# Altium footprint library Miscellaneous Devices.PcbLib: 306 footprints (part 10 of 20)
Each footprint in its own frame and in the unit in brackets; x right, y up, seen from the top. Pads: shape width x height; smd on the part's side, far side on the other; paste and mask are expansions set on the pad; w line width, h text height; cw(c..) or ccw(c..) is an arc to the next point about the centre after c.
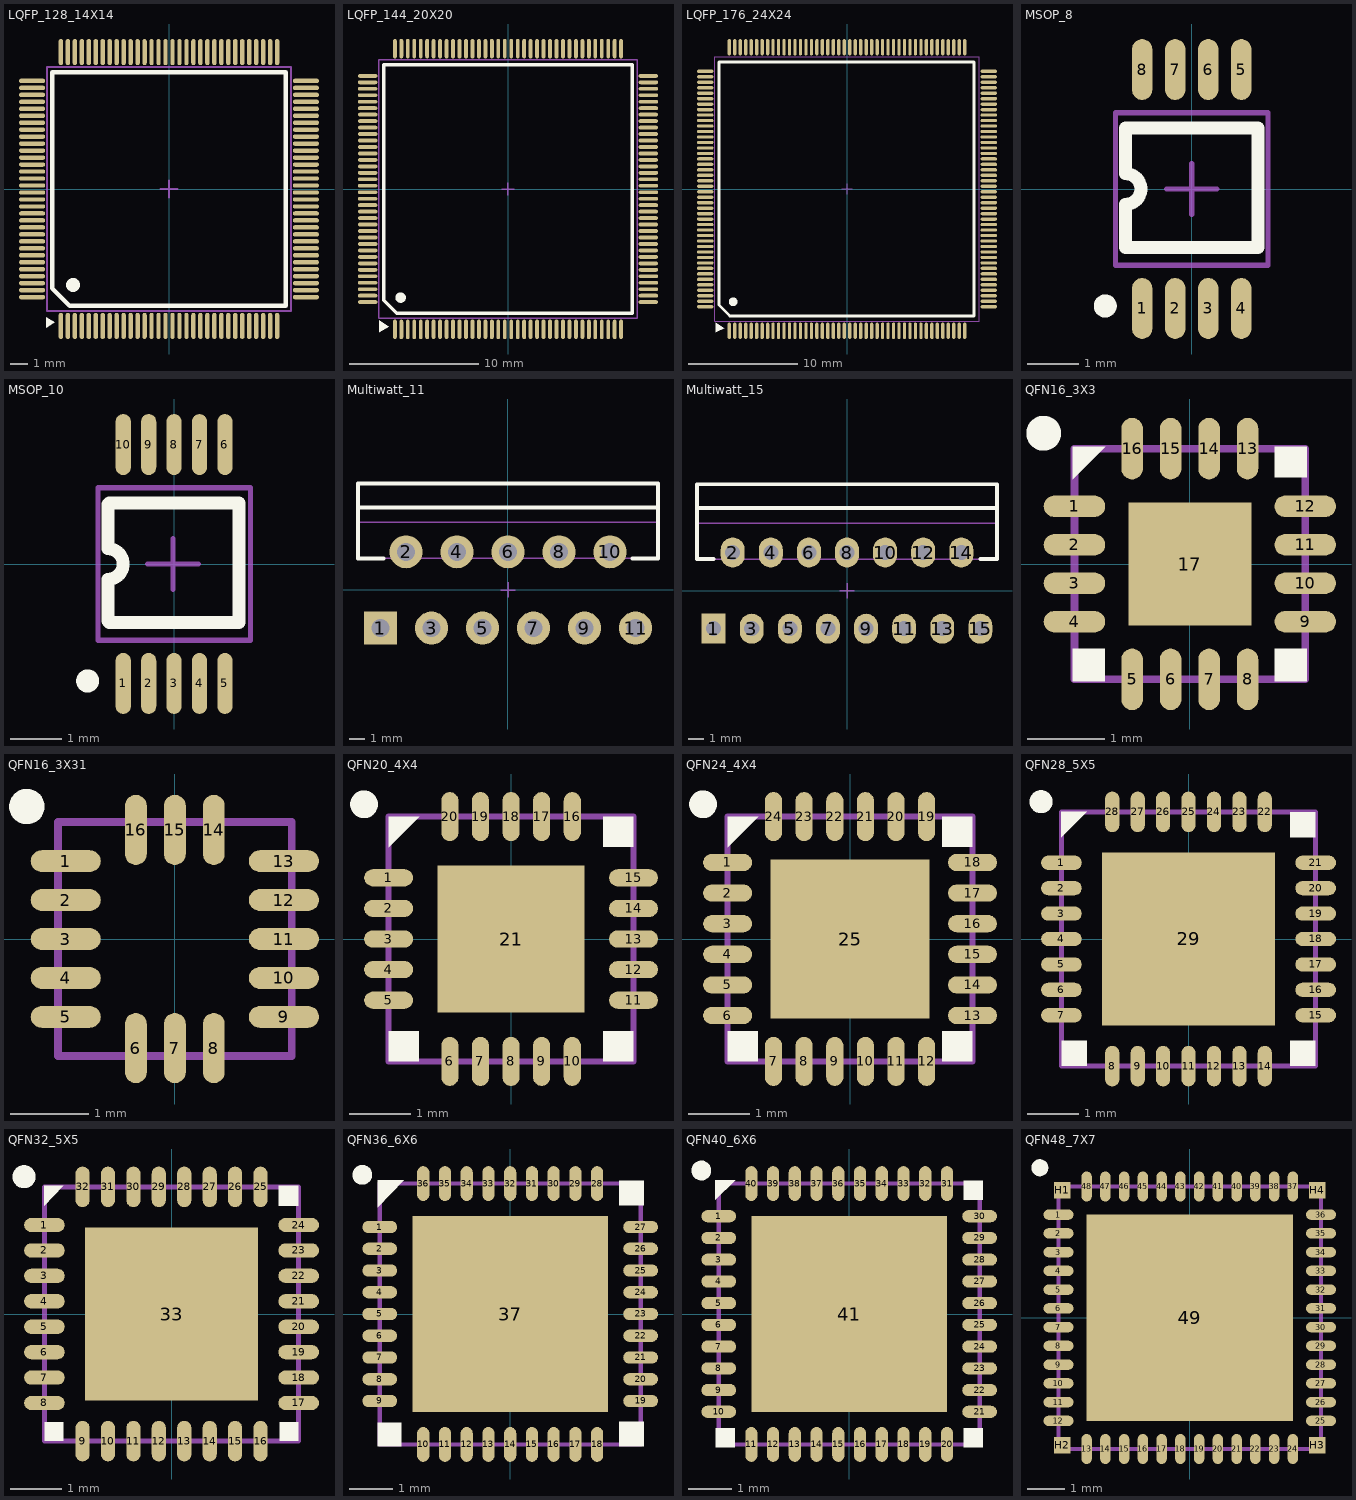
[diagram p9: the footprints below, top view; thin cyan lines are the x and y axes]

## LQFP_128_14X14 [mm]
pads (128):
  oval 0.25x1.5 smd mask+0.051: 1(-6.2,-7.85) 2(-5.8,-7.85) 3(-5.4,-7.85) 4(-5,-7.85) 5(-4.6,-7.85) 6(-4.2,-7.85) 7(-3.8,-7.85) 8(-3.4,-7.85) 9(-3,-7.85) 10(-2.6,-7.85) 11(-2.2,-7.85) 12(-1.8,-7.85) 13(-1.4,-7.85) 14(-1,-7.85) 15(-0.6,-7.85) 16(-0.2,-7.85) 17(0.2,-7.85) 18(0.6,-7.85) 19(1,-7.85) 20(1.4,-7.85) 21(1.8,-7.85) 22(2.2,-7.85) 23(2.6,-7.85) 24(3,-7.85) 25(3.4,-7.85) 26(3.8,-7.85) 27(4.2,-7.85) 28(4.6,-7.85) 29(5,-7.85) 30(5.4,-7.85) 31(5.8,-7.85) 32(6.2,-7.85) 65(6.2,7.85) 66(5.8,7.85) 67(5.4,7.85) 68(5,7.85) 69(4.6,7.85) 70(4.2,7.85) 71(3.8,7.85) 72(3.4,7.85) 73(3,7.85) 74(2.6,7.85) 75(2.2,7.85) 76(1.8,7.85) 77(1.4,7.85) 78(1,7.85) 79(0.6,7.85) 80(0.2,7.85) 81(-0.2,7.85) 82(-0.6,7.85) 83(-1,7.85) 84(-1.4,7.85) 85(-1.8,7.85) 86(-2.2,7.85) 87(-2.6,7.85) 88(-3,7.85) 89(-3.4,7.85) 90(-3.8,7.85) 91(-4.2,7.85) 92(-4.6,7.85) 93(-5,7.85) 94(-5.4,7.85) 95(-5.8,7.85) 96(-6.2,7.85)
  oval 1.5x0.25 smd mask+0.051: 33(7.85,-6.2) 34(7.85,-5.8) 35(7.85,-5.4) 36(7.85,-5) 37(7.85,-4.6) 38(7.85,-4.2) 39(7.85,-3.8) 40(7.85,-3.4) 41(7.85,-3) 42(7.85,-2.6) 43(7.85,-2.2) 44(7.85,-1.8) 45(7.85,-1.4) 46(7.85,-1) 47(7.85,-0.6) 48(7.85,-0.2) 49(7.85,0.2) 50(7.85,0.6) 51(7.85,1) 52(7.85,1.4) 53(7.85,1.8) 54(7.85,2.2) 55(7.85,2.6) 56(7.85,3) 57(7.85,3.4) 58(7.85,3.8) 59(7.85,4.2) 60(7.85,4.6) 61(7.85,5) 62(7.85,5.4) 63(7.85,5.8) 64(7.85,6.2) 97(-7.85,6.2) 98(-7.85,5.8) 99(-7.85,5.4) 100(-7.85,5) 101(-7.85,4.6) 102(-7.85,4.2) 103(-7.85,3.8) 104(-7.85,3.4) 105(-7.85,3) 106(-7.85,2.6) 107(-7.85,2.2) 108(-7.85,1.8) 109(-7.85,1.4) 110(-7.85,1) 111(-7.85,0.6) 112(-7.85,0.2) 113(-7.85,-0.2) 114(-7.85,-0.6) 115(-7.85,-1) 116(-7.85,-1.4) 117(-7.85,-1.8) 118(-7.85,-2.2) 119(-7.85,-2.6) 120(-7.85,-3) 121(-7.85,-3.4) 122(-7.85,-3.8) 123(-7.85,-4.2) 124(-7.85,-4.6) 125(-7.85,-5) 126(-7.85,-5.4) 127(-7.85,-5.8) 128(-7.85,-6.2)
Top Overlay:
  circle w0.4: c-5.5,-5.5 r0.2
  region: -7.05,-7.95 -6.55,-7.65 -7.05,-7.35
  lines w0.254: -6.7,-5.7 -6.7,6.7 6.7,6.7 6.7,-6.7 -5.7,-6.7 -6.7,-5.7
Mechanical 15:
  lines w0.1: -0.5,0 0.5,0 ; 0,-0.5 0,0.5 ; -7,-7 -7,7 7,7 7,-7 -7,-7
3D body: height 1.35, standoff 0, extent -8,-8 8,8

## LQFP_144_20X20 [mm]
pads (144):
  oval 0.3x1.5 smd: 1(-8.75,-10.85) 2(-8.25,-10.85) 3(-7.75,-10.85) 4(-7.25,-10.85) 5(-6.75,-10.85) 6(-6.25,-10.85) 7(-5.75,-10.85) 8(-5.25,-10.85) 9(-4.75,-10.85) 10(-4.25,-10.85) 11(-3.75,-10.85) 12(-3.25,-10.85) 13(-2.75,-10.85) 14(-2.25,-10.85) 15(-1.75,-10.85) 16(-1.25,-10.85) 17(-0.75,-10.85) 18(-0.25,-10.85) 19(0.25,-10.85) 20(0.75,-10.85) 21(1.25,-10.85) 22(1.75,-10.85) 23(2.25,-10.85) 24(2.75,-10.85) 25(3.25,-10.85) 26(3.75,-10.85) 27(4.25,-10.85) 28(4.75,-10.85) 29(5.25,-10.85) 30(5.75,-10.85) 31(6.25,-10.85) 32(6.75,-10.85) 33(7.25,-10.85) 34(7.75,-10.85) 35(8.25,-10.85) 36(8.75,-10.85) 73(8.75,10.85) 74(8.25,10.85) 75(7.75,10.85) 76(7.25,10.85) 77(6.75,10.85) 78(6.25,10.85) 79(5.75,10.85) 80(5.25,10.85) 81(4.75,10.85) 82(4.25,10.85) 83(3.75,10.85) 84(3.25,10.85) 85(2.75,10.85) 86(2.25,10.85) 87(1.75,10.85) 88(1.25,10.85) 89(0.75,10.85) 90(0.25,10.85) 91(-0.25,10.85) 92(-0.75,10.85) 93(-1.25,10.85) 94(-1.75,10.85) 95(-2.25,10.85) 96(-2.75,10.85) 97(-3.25,10.85) 98(-3.75,10.85) 99(-4.25,10.85) 100(-4.75,10.85) 101(-5.25,10.85) 102(-5.75,10.85) 103(-6.25,10.85) 104(-6.75,10.85) 105(-7.25,10.85) 106(-7.75,10.85) 107(-8.25,10.85) 108(-8.75,10.85)
  oval 1.5x0.3 smd: 37(10.85,-8.75) 38(10.85,-8.25) 39(10.85,-7.75) 40(10.85,-7.25) 41(10.85,-6.75) 42(10.85,-6.25) 43(10.85,-5.75) 44(10.85,-5.25) 45(10.85,-4.75) 46(10.85,-4.25) 47(10.85,-3.75) 48(10.85,-3.25) 49(10.85,-2.75) 50(10.85,-2.25) 51(10.85,-1.75) 52(10.85,-1.25) 53(10.85,-0.75) 54(10.85,-0.25) 55(10.85,0.25) 56(10.85,0.75) 57(10.85,1.25) 58(10.85,1.75) 59(10.85,2.25) 60(10.85,2.75) 61(10.85,3.25) 62(10.85,3.75) 63(10.85,4.25) 64(10.85,4.75) 65(10.85,5.25) 66(10.85,5.75) 67(10.85,6.25) 68(10.85,6.75) 69(10.85,7.25) 70(10.85,7.75) 71(10.85,8.25) 72(10.85,8.75) 109(-10.85,8.75) 110(-10.85,8.25) 111(-10.85,7.75) 112(-10.85,7.25) 113(-10.85,6.75) 114(-10.85,6.25) 115(-10.85,5.75) 116(-10.85,5.25) 117(-10.85,4.75) 118(-10.85,4.25) 119(-10.85,3.75) 120(-10.85,3.25) 121(-10.85,2.75) 122(-10.85,2.25) 123(-10.85,1.75) 124(-10.85,1.25) 125(-10.85,0.75) 126(-10.85,0.25) 127(-10.85,-0.25) 128(-10.85,-0.75) 129(-10.85,-1.25) 130(-10.85,-1.75) 131(-10.85,-2.25) 132(-10.85,-2.75) 133(-10.85,-3.25) 134(-10.85,-3.75) 135(-10.85,-4.25) 136(-10.85,-4.75) 137(-10.85,-5.25) 138(-10.85,-5.75) 139(-10.85,-6.25) 140(-10.85,-6.75) 141(-10.85,-7.25) 142(-10.85,-7.75) 143(-10.85,-8.25) 144(-10.85,-8.75)
Top Overlay:
  circle w0.4: c-8.3,-8.4 r0.2
  region: -9.225,-10.637 -9.975,-10.162 -9.975,-11.062
  lines w0.254: -9.6,-8.6 -9.6,9.6 9.6,9.6 9.6,-9.6 -8.6,-9.6 -9.6,-8.6
Mechanical 15:
  lines w0.1: -0.5,0 0.5,0 ; 0,-0.5 0,0.5 ; -10,-10 10,-10 10,10 -10,10 -10,-10
3D body: height 1.88, standoff -0.01, extent -11.102,-11.1 11.1,11.102

## LQFP_176_24X24 [mm]
pads (176):
  oval 0.3x1.5 smd: 1(-10.75,-12.95) 2(-10.25,-12.95) 3(-9.75,-12.95) 4(-9.25,-12.95) 5(-8.75,-12.95) 6(-8.25,-12.95) 7(-7.75,-12.95) 8(-7.25,-12.95) 9(-6.75,-12.95) 10(-6.25,-12.95) 11(-5.75,-12.95) 12(-5.25,-12.95) 13(-4.75,-12.95) 14(-4.25,-12.95) 15(-3.75,-12.95) 16(-3.25,-12.95) 17(-2.75,-12.95) 18(-2.25,-12.95) 19(-1.75,-12.95) 20(-1.25,-12.95) 21(-0.75,-12.95) 22(-0.25,-12.95) 23(0.25,-12.95) 24(0.75,-12.95) 25(1.25,-12.95) 26(1.75,-12.95) 27(2.25,-12.95) 28(2.75,-12.95) 29(3.25,-12.95) 30(3.75,-12.95) 31(4.25,-12.95) 32(4.75,-12.95) 33(5.25,-12.95) 34(5.75,-12.95) 35(6.25,-12.95) 36(6.75,-12.95) 37(7.25,-12.95) 38(7.75,-12.95) 39(8.25,-12.95) 40(8.75,-12.95) 41(9.25,-12.95) 42(9.75,-12.95) 43(10.25,-12.95) 44(10.75,-12.95) 89(10.75,12.95) 90(10.25,12.95) 91(9.75,12.95) 92(9.25,12.95) 93(8.75,12.95) 94(8.25,12.95) 95(7.75,12.95) 96(7.25,12.95) 97(6.75,12.95) 98(6.25,12.95) 99(5.75,12.95) 100(5.25,12.95) 101(4.75,12.95) 102(4.25,12.95) 103(3.75,12.95) 104(3.25,12.95) 105(2.75,12.95) 106(2.25,12.95) 107(1.75,12.95) 108(1.25,12.95) 109(0.75,12.95) 110(0.25,12.95) 111(-0.25,12.95) 112(-0.75,12.95) 113(-1.25,12.95) 114(-1.75,12.95) 115(-2.25,12.95) 116(-2.75,12.95) 117(-3.25,12.95) 118(-3.75,12.95) 119(-4.25,12.95) 120(-4.75,12.95) 121(-5.25,12.95) 122(-5.75,12.95) 123(-6.25,12.95) 124(-6.75,12.95) 125(-7.25,12.95) 126(-7.75,12.95) 127(-8.25,12.95) 128(-8.75,12.95) 129(-9.25,12.95) 130(-9.75,12.95) 131(-10.25,12.95) 132(-10.75,12.95)
  oval 1.5x0.3 smd: 45(12.95,-10.75) 46(12.95,-10.25) 47(12.95,-9.75) 48(12.95,-9.25) 49(12.95,-8.75) 50(12.95,-8.25) 51(12.95,-7.75) 52(12.95,-7.25) 53(12.95,-6.75) 54(12.95,-6.25) 55(12.95,-5.75) 56(12.95,-5.25) 57(12.95,-4.75) 58(12.95,-4.25) 59(12.95,-3.75) 60(12.95,-3.25) 61(12.95,-2.75) 62(12.95,-2.25) 63(12.95,-1.75) 64(12.95,-1.25) 65(12.95,-0.75) 66(12.95,-0.25) 67(12.95,0.25) 68(12.95,0.75) 69(12.95,1.25) 70(12.95,1.75) 71(12.95,2.25) 72(12.95,2.75) 73(12.95,3.25) 74(12.95,3.75) 75(12.95,4.25) 76(12.95,4.75) 77(12.95,5.25) 78(12.95,5.75) 79(12.95,6.25) 80(12.95,6.75) 81(12.95,7.25) 82(12.95,7.75) 83(12.95,8.25) 84(12.95,8.75) 85(12.95,9.25) 86(12.95,9.75) 87(12.95,10.25) 88(12.95,10.75) 133(-12.95,10.75) 134(-12.95,10.25) 135(-12.95,9.75) 136(-12.95,9.25) 137(-12.95,8.75) 138(-12.95,8.25) 139(-12.95,7.75) 140(-12.95,7.25) 141(-12.95,6.75) 142(-12.95,6.25) 143(-12.95,5.75) 144(-12.95,5.25) 145(-12.95,4.75) 146(-12.95,4.25) 147(-12.95,3.75) 148(-12.95,3.25) 149(-12.95,2.75) 150(-12.95,2.25) 151(-12.95,1.75) 152(-12.95,1.25) 153(-12.95,0.75) 154(-12.95,0.25) 155(-12.95,-0.25) 156(-12.95,-0.75) 157(-12.95,-1.25) 158(-12.95,-1.75) 159(-12.95,-2.25) 160(-12.95,-2.75) 161(-12.95,-3.25) 162(-12.95,-3.75) 163(-12.95,-4.25) 164(-12.95,-4.75) 165(-12.95,-5.25) 166(-12.95,-5.75) 167(-12.95,-6.25) 168(-12.95,-6.75) 169(-12.95,-7.25) 170(-12.95,-7.75) 171(-12.95,-8.25) 172(-12.95,-8.75) 173(-12.95,-9.25) 174(-12.95,-9.75) 175(-12.95,-10.25) 176(-12.95,-10.75)
Top Overlay:
  circle w0.4: c-10.4,-10.3 r0.2
  region: -11.2,-12.7 -12,-12.2 -12,-13.1
  lines w0.254: -11.7,-10.6 -10.7,-11.6 11.6,-11.6 11.6,11.6 -11.7,11.6 -11.7,-10.6
Mechanical 15:
  lines w0.1: -0.5,0 0.5,0 ; 0,-0.5 0,0.5 ; -12.1,-12.1 -12.1,12.1 12.1,12.1 12.1,-12.1 -12.1,-12.1
3D body: height 1.56, standoff -0.01, extent -12.892,-12.886 12.88,12.886

## MSOP_8 [mm]
pads (8):
  oval 0.4x1.2 smd: 1(-0.975,-2.35) 2(-0.325,-2.35) 3(0.325,-2.35) 4(0.975,-2.35) 5(0.975,2.35) 6(0.325,2.35) 7(-0.325,2.35) 8(-0.975,2.35)
Top Overlay:
  circle w0.254: c-1.7,-2.3 r0.1
  lines w0.254: -1.3,-1.15 1.3,-1.15 1.3,1.2 -1.3,1.2 -1.3,0.3 cw(c-1.3,0) -1.3,-0.3 -1.3,-1.15
Mechanical 15:
  lines w0.1: -0.5,0 0.5,0 ; 0,-0.5 0,0.5 ; -1.5,-1.5 1.5,-1.5 1.5,1.5 -1.5,1.5 -1.5,-1.5
3D body: height 1.15, standoff 0, extent -1.5,-2.45 1.5,2.45

## MSOP_10 [mm]
pads (10):
  oval 0.3x1.2 smd: 1(-1,-2.35) 2(-0.5,-2.35) 3(0,-2.35) 4(0.5,-2.35) 5(1,-2.35) 6(1,2.35) 7(0.5,2.35) 8(0,2.35) 9(-0.5,2.35) 10(-1,2.35)
Top Overlay:
  circle w0.254: c-1.7,-2.3 r0.1
  lines w0.254: -1.3,-1.125 -1.3,-0.3 ccw(c-1.3,0) -1.3,0.3 -1.3,1.175 -1.275,1.2 1.275,1.2 1.275,-1.15 -1.275,-1.15 -1.3,-1.125
Mechanical 15:
  lines w0.1: -0.525,0 0.475,0 ; -0.025,-0.5 -0.025,0.5 ; -1.5,-1.5 -1.5,1.5 1.5,1.5 1.5,-1.5 -1.5,-1.5
3D body: height 1.25, standoff 0, extent -1.5,-2.514 1.5,2.386

## Multiwatt_11 [mm]
pads (11):
  rect 2.2x2.2 hole 1.2: 1(-8.5,-2.54)
  round 2.2 hole 1.2: 2(-6.8,2.54) 3(-5.1,-2.54) 4(-3.4,2.54) 5(-1.7,-2.54) 6(0,2.54) 7(1.7,-2.54) 8(3.4,2.54) 9(5.1,-2.54) 10(6.8,2.54) 11(8.5,-2.54)
Top Overlay:
  lines w0.25: -10,7.1 10,7.1
  lines w0.254: -10,5.5 10,5.5 ; -10,7.1 -10,2.1 -8.3,2.1 ; 8.3,2.1 10,2.1 10,7.1
Mechanical 15:
  lines w0.1: -10,5.5 10,5.5 ; -0.5,-0.01 0.5,-0.01 ; 0,-0.5 0,0.5 ; -10,4.5 -10,2.1 10,2.1 10,4.5 ; -10,4.5 10,4.5 ; -10,4.5 -10,7.1 10,7.1 10,4.5
3D body: height 21.8, standoff -3.2, extent -10.1,-2.85 10.1,7.04

## Multiwatt_15 [mm]
pads (15):
  rect 1.6x2 hole 1: 1(-8.89,-2.54)
  oval 1.6x2 hole 1: 2(-7.62,2.54) 3(-6.35,-2.54) 4(-5.08,2.54) 5(-3.81,-2.54) 6(-2.54,2.54) 7(-1.27,-2.54) 8(0,2.54) 9(1.27,-2.54) 10(2.54,2.54) 11(3.81,-2.54) 12(5.08,2.54) 13(6.35,-2.54) 14(7.62,2.54) 15(8.89,-2.54)
Top Overlay:
  lines w0.25: -10,7.09 10,7.09
  lines w0.254: -10,5.5 10,5.5 ; -10,7.09 -10,2.1 -8.9,2.1 ; 8.9,2.1 10,2.1 10,7.09
Mechanical 15:
  lines w0.1: -10,4.5 10,4.5 ; -10,5.5 10,5.5 ; -0.5,-0.01 0.5,-0.01 ; 0,-0.5 0,0.5 ; -10,2.1 -10,7.09 10,7.09 10,2.1 -10,2.1
3D body: height 21.5, standoff -3.42, extent -9.8,-2.4 9.8,6.668

## QFN16_3X3 [mm]
pads (17):
  oval 0.8x0.28 smd: 1(-1.5,0.75) 2(-1.5,0.25) 3(-1.5,-0.25) 4(-1.5,-0.75) 9(1.5,-0.75) 10(1.5,-0.25) 11(1.5,0.25) 12(1.5,0.75)
  oval 0.28x0.8 smd: 5(-0.75,-1.5) 6(-0.25,-1.5) 7(0.25,-1.5) 8(0.75,-1.5) 13(0.75,1.5) 14(0.25,1.5) 15(-0.25,1.5) 16(-0.75,1.5)
  rect 1.6x1.6 smd: 17(0,0)
Top Overlay:
  circle w0.254: c-1.9,1.7 r0.1
  rectangle: 1.1,1.125 1.525,1.525
  rectangle: 1.1,-1.525 1.525,-1.1
  rectangle: -1.525,-1.525 -1.1,-1.1
  region: -1.525,1.525 -1.1,1.525 -1.525,1.1
Mechanical 15:
  lines w0.1: -1.5,-1.5 1.5,-1.5 1.5,1.5 -1.5,1.5 -1.5,-1.5
3D body: height 0.9, standoff 0, extent -1.517,-1.525 1.525,1.517

## QFN16_3X31 [mm]
pads (16):
  oval 0.9x0.28 smd: 1(-1.4,1) 2(-1.4,0.5) 3(-1.4,0) 4(-1.4,-0.5) 5(-1.4,-1) 9(1.4,-1) 10(1.4,-0.5) 11(1.4,0) 12(1.4,0.5) 13(1.4,1)
  oval 0.28x0.9 smd: 6(-0.5,-1.4) 7(0,-1.4) 8(0.5,-1.4) 14(0.5,1.4) 15(0,1.4) 16(-0.5,1.4)
Top Overlay:
  circle w0.254: c-1.9,1.7 r0.1
Mechanical 15:
  lines w0.1: -1.5,-1.5 -1.5,1.5 1.5,1.5 1.5,-1.5 -1.5,-1.5
3D body: height 0.9, standoff 0, extent -1.517,-1.525 1.525,1.517

## QFN20_4X4 [mm]
pads (21):
  oval 0.8x0.28 smd: 1(-2,1) 2(-2,0.5) 3(-2,0) 4(-2,-0.5) 5(-2,-1) 11(2,-1) 12(2,-0.5) 13(2,0) 14(2,0.5) 15(2,1)
  oval 0.28x0.8 smd: 6(-1,-2) 7(-0.5,-2) 8(0,-2) 9(0.5,-2) 10(1,-2) 16(1,2) 17(0.5,2) 18(0,2) 19(-0.5,2) 20(-1,2)
  rect 2.4x2.4 smd: 21(0,0)
Top Overlay:
  circle w0.254: c-2.4,2.2 r0.1
  rectangle: 1.5,1.5 2,2
  rectangle: 1.5,-2 2,-1.5
  rectangle: -2,-2 -1.5,-1.5
  region: -2,2 -1.5,2 -2,1.5
Mechanical 15:
  lines w0.1: -2,-2 -2,2 2,2 2,-2 -2,-2
3D body: height 0.92, standoff 0, extent -2,-2 2,2

## QFN24_4X4 [mm]
pads (25):
  oval 0.8x0.28 smd: 1(-2,1.25) 2(-2,0.75) 3(-2,0.25) 4(-2,-0.25) 5(-2,-0.75) 6(-2,-1.25) 13(2,-1.25) 14(2,-0.75) 15(2,-0.25) 16(2,0.25) 17(2,0.75) 18(2,1.25)
  oval 0.28x0.8 smd: 7(-1.25,-2) 8(-0.75,-2) 9(-0.25,-2) 10(0.25,-2) 11(0.75,-2) 12(1.25,-2) 19(1.25,2) 20(0.75,2) 21(0.25,2) 22(-0.25,2) 23(-0.75,2) 24(-1.25,2)
  rect 2.6x2.6 smd: 25(0,0)
Top Overlay:
  circle w0.254: c-2.4,2.2 r0.1
  region: 1.5,2 1.5,1.5 2,1.5 2,2
  region: 1.5,-1.5 1.5,-2 2,-2 2,-1.5
  region: -2,-1.5 -2,-2 -1.5,-2 -1.5,-1.5
  region: -1.5,2 -2,2 -2,1.5
Mechanical 15:
  lines w0.1: -2,-2 2,-2 2,2 -2,2 -2,-2
3D body: height 0.9, standoff 0, extent -2,-2.002 2.004,2.002

## QFN28_5X5 [mm]
pads (29):
  oval 0.8x0.28 smd: 1(-2.5,1.5) 2(-2.5,1) 3(-2.5,0.5) 4(-2.5,0) 5(-2.5,-0.5) 6(-2.5,-1) 7(-2.5,-1.5) 15(2.5,-1.5) 16(2.5,-1) 17(2.5,-0.5) 18(2.5,0) 19(2.5,0.5) 20(2.5,1) 21(2.5,1.5)
  oval 0.28x0.8 smd: 8(-1.5,-2.5) 9(-1,-2.5) 10(-0.5,-2.5) 11(0,-2.5) 12(0.5,-2.5) 13(1,-2.5) 14(1.5,-2.5) 22(1.5,2.5) 23(1,2.5) 24(0.5,2.5) 25(0,2.5) 26(-0.5,2.5) 27(-1,2.5) 28(-1.5,2.5)
  rect 3.4x3.4 smd: 29(0,0)
Top Overlay:
  circle w0.254: c-2.9,2.7 r0.1
  rectangle: 2,2 2.5,2.5
  rectangle: -2.5,-2.5 -2,-2
  rectangle: 2,-2.5 2.5,-2
  region: -2.5,2.5 -2.5,2 -2,2.5
Mechanical 15:
  lines w0.1: -2.5,-2.5 2.5,-2.5 2.5,2.5 -2.5,2.5 -2.5,-2.5
3D body: height 1, standoff 0, extent -2.5,-2.5 2.5,2.5

## QFN32_5X5 [mm]
pads (33):
  oval 0.8x0.28 smd: 1(-2.5,1.75) 2(-2.5,1.25) 3(-2.5,0.75) 4(-2.5,0.25) 5(-2.5,-0.25) 6(-2.5,-0.75) 7(-2.5,-1.25) 8(-2.5,-1.75) 17(2.5,-1.75) 18(2.5,-1.25) 19(2.5,-0.75) 20(2.5,-0.25) 21(2.5,0.25) 22(2.5,0.75) 23(2.5,1.25) 24(2.5,1.75)
  oval 0.28x0.8 smd: 9(-1.75,-2.5) 10(-1.25,-2.5) 11(-0.75,-2.5) 12(-0.25,-2.5) 13(0.25,-2.5) 14(0.75,-2.5) 15(1.25,-2.5) 16(1.75,-2.5) 25(1.75,2.5) 26(1.25,2.5) 27(0.75,2.5) 28(0.25,2.5) 29(-0.25,2.5) 30(-0.75,2.5) 31(-1.25,2.5) 32(-1.75,2.5)
  rect 3.4x3.4 smd: 33(0,0)
Top Overlay:
  circle w0.254: c-2.9,2.7 r0.1
  rectangle: 2.1,2.125 2.5,2.525
  rectangle: 2.125,-2.5 2.5,-2.125
  rectangle: -2.5,-2.5 -2.125,-2.125
  region: -2.5,2.525 -2.125,2.525 -2.5,2.125
Mechanical 15:
  lines w0.1: -2.5,-2.5 -2.5,2.5 2.5,2.5 2.5,-2.5 -2.5,-2.5
3D body: height 0.75, standoff 0, extent -2.51,-2.5 2.51,2.52

## QFN36_6X6 [mm]
pads (37):
  oval 0.8x0.28 smd: 1(-3,2) 2(-3,1.5) 3(-3,1) 4(-3,0.5) 5(-3,0) 6(-3,-0.5) 7(-3,-1) 8(-3,-1.5) 9(-3,-2) 19(3,-2) 20(3,-1.5) 21(3,-1) 22(3,-0.5) 23(3,0) 24(3,0.5) 25(3,1) 26(3,1.5) 27(3,2)
  oval 0.28x0.8 smd: 10(-2,-3) 11(-1.5,-3) 12(-1,-3) 13(-0.5,-3) 14(0,-3) 15(0.5,-3) 16(1,-3) 17(1.5,-3) 18(2,-3) 28(2,3) 29(1.5,3) 30(1,3) 31(0.5,3) 32(0,3) 33(-0.5,3) 34(-1,3) 35(-1.5,3) 36(-2,3)
  rect 4.5x4.5 smd: 37(0,0)
Top Overlay:
  circle w0.254: c-3.4,3.2 r0.1
  rectangle: -3.05,-3.05 -2.5,-2.5
  rectangle: 2.5,-3.05 3.075,-2.475
  rectangle: 2.5,2.5 3.075,3.075
  region: -3.05,3.075 -3.05,2.45 -2.45,3.075
Mechanical 15:
  lines w0.1: -3,-3 3,-3 3,3 -3,3 -3,-3
3D body: height 0.8, standoff 0, extent -3.05,-3.05 3.07,3.07

## QFN40_6X6 [mm]
pads (41):
  oval 0.8x0.28 smd: 1(-3,2.25) 2(-3,1.75) 3(-3,1.25) 4(-3,0.75) 5(-3,0.25) 6(-3,-0.25) 7(-3,-0.75) 8(-3,-1.25) 9(-3,-1.75) 10(-3,-2.25) 21(3,-2.25) 22(3,-1.75) 23(3,-1.25) 24(3,-0.75) 25(3,-0.25) 26(3,0.25) 27(3,0.75) 28(3,1.25) 29(3,1.75) 30(3,2.25)
  oval 0.28x0.8 smd: 11(-2.25,-3) 12(-1.75,-3) 13(-1.25,-3) 14(-0.75,-3) 15(-0.25,-3) 16(0.25,-3) 17(0.75,-3) 18(1.25,-3) 19(1.75,-3) 20(2.25,-3) 31(2.25,3) 32(1.75,3) 33(1.25,3) 34(0.75,3) 35(0.25,3) 36(-0.25,3) 37(-0.75,3) 38(-1.25,3) 39(-1.75,3) 40(-2.25,3)
  rect 4.5x4.5 smd: 41(0,0)
Top Overlay:
  circle w0.254: c-3.4,3.3 r0.1
  rectangle: 2.625,2.625 3.075,3.075
  rectangle: 2.625,-3.075 3.075,-2.625
  rectangle: -3.075,-3.075 -2.625,-2.625
  region: -3.075,3.075 -2.625,3.075 -3.075,2.625
Mechanical 15:
  lines w0.1: -3,-3 -3,3 3,3 3,-3 -3,-3
3D body: height 1.05, standoff 0, extent -3.075,-3.075 3.075,3.075

## QFN48_7X7 [mm]
pads (53):
  oval 0.8x0.28 smd: 1(-3.5,2.75) 2(-3.5,2.25) 3(-3.5,1.75) 4(-3.5,1.25) 5(-3.5,0.75) 6(-3.5,0.25) 7(-3.5,-0.25) 8(-3.5,-0.75) 9(-3.5,-1.25) 10(-3.5,-1.75) 11(-3.5,-2.25) 12(-3.5,-2.75) 25(3.5,-2.75) 26(3.5,-2.25) 27(3.5,-1.75) 28(3.5,-1.25) 29(3.5,-0.75) 30(3.5,-0.25) 31(3.5,0.25) 32(3.5,0.75) 33(3.5,1.25) 34(3.5,1.75) 35(3.5,2.25) 36(3.5,2.75)
  oval 0.28x0.8 smd: 13(-2.75,-3.5) 14(-2.25,-3.5) 15(-1.75,-3.5) 16(-1.25,-3.5) 17(-0.75,-3.5) 18(-0.25,-3.5) 19(0.25,-3.5) 20(0.75,-3.5) 21(1.25,-3.5) 22(1.75,-3.5) 23(2.25,-3.5) 24(2.75,-3.5) 37(2.75,3.5) 38(2.25,3.5) 39(1.75,3.5) 40(1.25,3.5) 41(0.75,3.5) 42(0.25,3.5) 43(-0.25,3.5) 44(-0.75,3.5) 45(-1.25,3.5) 46(-1.75,3.5) 47(-2.25,3.5) 48(-2.75,3.5)
  rect 5.5x5.5 smd: 49(0,0)
  rect 0.45x0.45 smd: H1(-3.4,3.4) H2(-3.4,-3.4) H3(3.4,-3.4) H4(3.4,3.4)
Top Overlay:
  circle w0.254: c-4,4 r0.1
Mechanical 15:
  lines w0.1: -3.5,-3.5 3.5,-3.5 3.5,3.5 -3.5,3.5 -3.5,-3.5
3D body: height 0.78, standoff -0.02, extent -3.52,-3.5 3.5,3.52